# Altium footprint library CGM.PcbLib: 11 footprints
Each footprint in its own frame and in the unit in brackets; x right, y up, seen from the top. Pads: shape width x height; smd on the part's side, far side on the other; paste and mask are expansions set on the pad; w line width, h text height; cw(c..) or ccw(c..) is an arc to the next point about the centre after c.
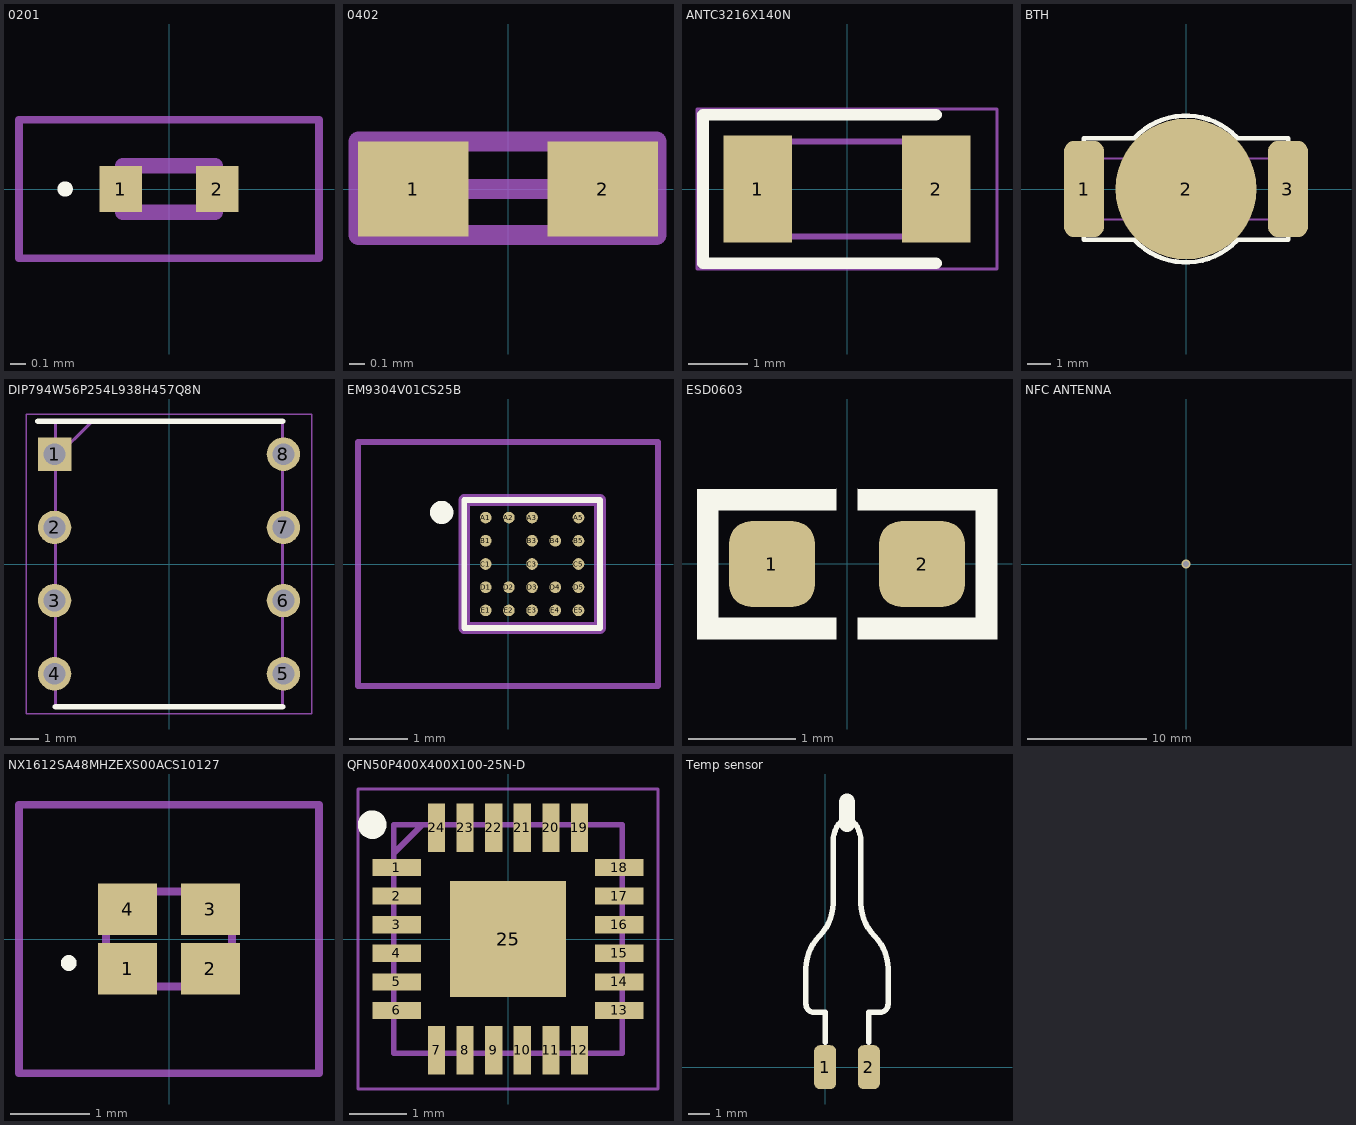
[diagram p0: the footprints below, top view; thin cyan lines are the x and y axes]

## 0201 [mm]
pads (2):
  rect 0.275x0.3 smd: 1(-0.313,0) 2(0.313,0)
Top Overlay:
  lines w0.05: -0.675,-0.025 cw(c-0.675,0) -0.675,0.025 cw(c-0.675,0) -0.675,-0.025
Mechanical 13:
  lines w0.1: -0.3,-0.15 0.3,-0.15 0.3,0.15 -0.3,0.15 -0.3,-0.15
Mechanical 15:
  lines w0.05: -0.975,-0.45 0.975,-0.45 0.975,0.45 -0.975,0.45 -0.975,-0.45
3D body "ERJ1GNJ103C.stp": height 0.23, standoff 0, extent -0.3,-0.15 0.3,0.15

## 0402 [mm]
pads (2):
  rect 0.7x0.6 smd: 1(-0.6,0) 2(0.6,0)
Mechanical 13:
  lines w0.127: -0.6,0 0.6,0 ; -0.947,-0.292 0.94,-0.292 0.94,0.3 -0.947,0.3 -0.947,-0.292
3D body "7427927141.stp": height 0.5, standoff 0, extent -0.5,-0.25 0.5,0.25

## ANTC3216X140N [mm]
pads (2):
  rect 1.15x1.8 smd: 1(-1.5,0) 2(1.5,0)
Top Overlay:
  lines w0.2: 1.5,-1.25 -2.425,-1.25 -2.425,1.25 1.5,1.25
Mechanical 13:
  lines w0.1: -1.6,0.225 -1.025,0.8 ; -1.6,-0.8 -1.6,0.8 1.6,0.8 1.6,-0.8 -1.6,-0.8
Mechanical 15:
  lines w0.05: -2.525,-1.35 -2.525,1.35 2.525,1.35 2.525,-1.35 -2.525,-1.35
3D body "AMCA31-2R450G-S1F-T.stp": height 1.4, standoff 0, extent -1.6,-0.8 1.6,0.8

## BTH [mm] "BUTTON CELL BATTERY RETAINER 2994"
height 1.2
pads (3):
  rrect50% 1.7x4.1 smd: 1(-4.343,0) 3(4.343,0)
  round 6 smd: 2(0,0)
Top Overlay:
  lines w0.2: -4.354,-1.962 -4.354,-2.162 -2.215,-2.162 ; -4.354,1.962 -4.354,2.162 -2.215,2.162 ; -2.204,-2.163 ccw(c0,-0.127) 2.185,-2.183 ; -2.204,2.163 cw(c0,0.127) 2.185,2.183 ; 2.208,-2.162 4.354,-2.162 4.354,-1.962 ; 2.208,2.162 4.354,2.162 4.354,1.962
Mechanical 13:
  circle w0.1: c0,0 r2.4
  lines w0.1: -4,-1.3 -4,1.3 4,1.3 4,-1.3 -4,-1.3
3D body: height 1.4, standoff 0, extent -2.6,-1.3 2.6,1.3
3D body: height 0.2, standoff 0, extent 2.6,-1.3 4,1.3
3D body: height 0.2, standoff 0, extent -4,-1.3 -2.6,1.3
3D body: height 1.2, standoff 0, extent -2.381,-2.395 2.4,2.395

## DIP794W56P254L938H457Q8N [mm]
pads (8):
  rect 1.16x1.16 hole 0.76: 1(-3.97,3.81)
  round 1.16 hole 0.76: 2(-3.97,1.27) 3(-3.97,-1.27) 4(-3.97,-3.81) 5(3.97,-3.81) 6(3.97,-1.27) 7(3.97,1.27) 8(3.97,3.81)
Top Overlay:
  lines w0.2: -4.55,4.955 3.935,4.955 ; -3.935,-4.955 3.935,-4.955
Mechanical 13:
  lines w0.1: -3.935,3.685 -2.665,4.955 ; -3.935,-4.955 3.935,-4.955 3.935,4.955 -3.935,4.955 -3.935,-4.955
Mechanical 15:
  lines w0.05: -4.96,-5.205 4.96,-5.205 4.96,5.205 -4.96,5.205 -4.96,-5.205
3D body "MAX3486EEPA+.stp": height 4.57, standoff -3.5, extent -4.11,-4.687 4.11,4.687

## EM9304V01CS25B [mm]
height 9.91
pads (21):
  round 0.2 smd: A1(-0.385,0.8) A2(0.015,0.8) A3(0.415,0.8) A5(1.215,0.8) B1(-0.385,0.4) B3(0.415,0.4) B4(0.815,0.4) B5(1.215,0.4) C1(-0.385,0) C3(0.415,0) C5(1.215,0) D1(-0.385,-0.4) D2(0.015,-0.4) D3(0.415,-0.4) D4(0.815,-0.4) D5(1.215,-0.4) E1(-0.385,-0.8) E2(0.015,-0.8) E3(0.415,-0.8) E4(0.815,-0.8) E5(1.215,-0.8)
Top Overlay:
  lines w0.1: -0.755,-1.103 -0.755,1.103 1.585,1.103 1.585,-1.103 -0.755,-1.103
  lines w0.2: -1.143,0.789 ccw(c-1.143,0.889) -1.143,0.989 ccw(c-1.143,0.889) -1.143,0.789
Mechanical 13:
  lines w0.2: -0.755,-1.103 -0.755,1.103 1.585,1.103 1.585,-1.103 -0.755,-1.103
Mechanical 15:
  lines w0.1: -2.585,-2.103 -2.585,2.103 2.585,2.103 2.585,-2.103 -2.585,-2.103

## ESD0603 [mm] "CHIP ESD Suppressor 0603ESDA2-TR2, 1.6x0.8mm, 0603"
height 0.8
pads (2):
  rrect50% 0.8x0.8 smd paste-0.05 mask+0.075: 1(-0.7,0) 2(0.7,0)
Top Overlay:
  region: -0.1,-0.5 -0.1,-0.7 -1.4,-0.7 -1.4,-0.5
  region: -0.1,0.5 -0.1,0.7 -1.4,0.7 -1.4,0.5
  region: -1.4,0.7 -1.2,0.7 -1.2,-0.7 -1.4,-0.7
  region: 1.4,0.7 1.2,0.7 1.2,-0.7 1.4,-0.7
  region: 0.1,0.5 0.1,0.7 1.4,0.7 1.4,0.5
  region: 0.1,-0.5 0.1,-0.7 1.4,-0.7 1.4,-0.5
3D body "ESD Suppressor 0603 SMD.STEP": height 0.79, standoff -0.01, extent -0.85,-0.45 0.85,0.45

## NFC ANTENNA [mm]
via 0,0 diameter 0.762 hole 0.508
Mid-Layer 1:
  lines w0.3: -12.267,0.053 -12.468,0.254 -12.468,1.434 cw(c0,0) -12.374,-2.092 -12.374,-0.997 -11.695,-0.317 -11.695,0.49 -11.821,0.616 -12.021,0.816 -12.021,1.382 cw(c0,0) -11.931,-2.017 -11.909,-1.517 -11.803,-1.315 -11.233,-0.786 -11.233,0.935 -11.574,1.276 ; -11.574,1.331 cw(c0,0) -11.487,-1.942 -10.725,-1.259 -10.725,1.192 -10.36,1.557

## NX1612SA48MHZEXS00ACS10127 [mm]
pads (4):
  rect 0.75x0.65 smd: 1(-0.525,-0.375) 2(0.525,-0.375) 3(0.525,0.375) 4(-0.525,0.375)
Top Overlay:
  lines w0.1: -1.27,-0.354 cw(c-1.27,-0.304) -1.27,-0.254 cw(c-1.27,-0.304) -1.27,-0.354
Mechanical 13:
  lines w0.1: -0.8,-0.6 0.8,-0.6 0.8,0.6 -0.8,0.6 -0.8,-0.6
Mechanical 15:
  lines w0.1: -1.9,-1.7 1.9,-1.7 1.9,1.7 -1.9,1.7 -1.9,-1.7
3D body "NX1612SA-48MHZ-EXS00A-CS10127.stp": height 0.45, standoff 0, extent -0.835,-0.635 0.835,0.635

## QFN50P400X400X100-25N-D [mm]
height 9.91
pads (25):
  rect 0.85x0.3 smd: 1(-1.95,1.25) 2(-1.95,0.75) 3(-1.95,0.25) 4(-1.95,-0.25) 5(-1.95,-0.75) 6(-1.95,-1.25) 13(1.95,-1.25) 14(1.95,-0.75) 15(1.95,-0.25) 16(1.95,0.25) 17(1.95,0.75) 18(1.95,1.25)
  rect 0.3x0.85 smd: 7(-1.25,-1.95) 8(-0.75,-1.95) 9(-0.25,-1.95) 10(0.25,-1.95) 11(0.75,-1.95) 12(1.25,-1.95) 19(1.25,1.95) 20(0.75,1.95) 21(0.25,1.95) 22(-0.25,1.95) 23(-0.75,1.95) 24(-1.25,1.95)
  rect 2.032x2.032 smd: 25(0,0)
Top Overlay:
  circle w0.25: c-2.375,2 r0.125
Mechanical 13:
  lines w0.1: -2,1.5 -1.5,2 ; -2,-2 -2,2 2,2 2,-2 -2,-2
Mechanical 15:
  lines w0.05: -2.625,-2.625 -2.625,2.625 2.625,2.625 2.625,-2.625 -2.625,-2.625
3D body "RF430FRL152HCRGER.stp": height 1, standoff 0, extent -2,-2 2,2

## Temp sensor [mil]
pads (2):
  rrect50% 40x80 smd: 1(0,0) 2(80,0)
Top Overlay:
  lines w10: 0,45 0,100 ; 80,45 80,100 100,100 ccw(c100,115) 115,115 115,180 ccw(c30.5,180) 90.25,239.75 cw(c150,299.5) 65.5,299.5 65.5,412.57 ccw(c12.57,412.57) 50,450 cw(c74.14,474.14) 40,474.14 cw(c5.86,474.14) 30,450 ccw(c67.43,412.57) 14.5,412.57 14.5,299.5 cw(c-70,299.5) -10.25,239.75 ccw(c49.5,180) -35,180 -35,115 ccw(c-20,115) -20,100 ; -20,100 0,100 ; -20,100 0,100
  lines w30: 40,445 40,485